# Altium schematic symbol library C_6nF8.SchLib: 1 symbol
Pins are listed as number, name and electrical type; pins without a type are passive.

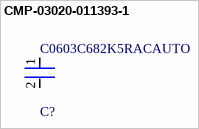
[diagram p0: symbol CMP-03020-011393-1]

## CMP-03020-011393-1
designator C?, comment C0603C682K5RACAUTO
CAP CER 6800PF 50V X7R 0603; Manufacturer: KEMET; Capacitance: 6,800 pF; Automotive Grade: Grade 1; Material: Ceramic; Value: 6,800 pF; Tolerance: 0.1; Temperature Coefficient: 30ppm/°C; Category: Cap; Temperature Characteristic: X7R; ComponentLink2URL: https://api.kemet.com/component-edge/download/datasheet/C0603C100J5GACAUTO.pdf; Octopart: https://octopart.com/c0603c682k5racauto-kemet-22884307; ComponentLink2Description: Datasheet; Temperature Range High: +125°C; Automotive: Yes; Package: C0603C-CF; Manufacturer Part Number: C0603C682K5RACAUTO; Device Class L1: Passive Components; Lead Free: Yes; Device Class L3: Ceramic Capacitors; Temperature: -55°C to +125°C; Height: 0.87mm; Voltage Rating: 50 V; RoHS: TRUE; Device Class L2: Capacitors; Digikey Description: CAP CER 6800PF 50V X7R 0603; Temperature Range Low: -55°C
footprint FP-C0603C-CF-IPC_B
footprint FP-C0603C-CF-MFG
footprint FP-C0603C-CF-IPC_A
footprint FP-C0603C-CF-IPC_C
pins: 1, 2